# Altium footprint library BC9VPC.PcbLib: 1 footprints
Each footprint in its own frame and in the unit in brackets; x right, y up, seen from the top. Pads: shape width x height; smd on the part's side, far side on the other; paste and mask are expansions set on the pad; w line width, h text height; cw(c..) or ccw(c..) is an arc to the next point about the centre after c.
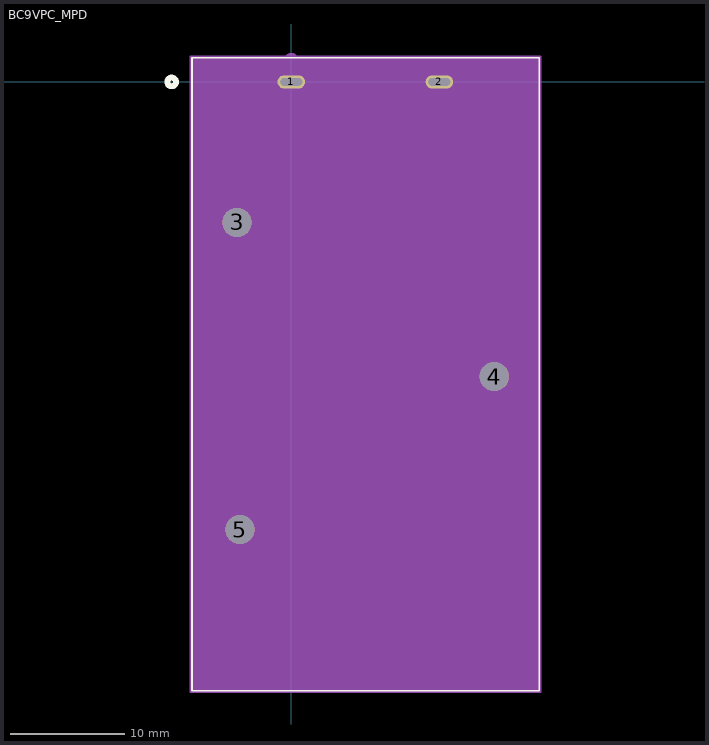
[diagram p0: the footprint, top view; thin cyan lines are the x and y axes]

## BC9VPC_MPD [mil]
pads (5):
  oval 95x46 hole 26 slot 75 at 0 deg paste-99999 mask+0: 1(0,0) 2(510,0)
  round 100 hole 100 unplated paste-99999 mask+0: 3(-187,-484) 4(699,-1015) 5(-177,-1542)
Top Overlay:
  circle w20: c-412,0 r15
  lines w6: -342,-2097 854,-2097 854,83 -342,83 -342,-2097
  text ".Designator" at 118.5,-25 h50
Bottom Overlay:
  circle w20: c-412,0 r15
Mechanical 13:
  circle w20: c0,75 r15
  lines w1: -337,-2092 849,-2092 849,78 -337,78 -337,-2092
  text ".Designator" at 118.5,-25 h50
Mechanical 15:
  region: 859,88 -347,88 -347,-2102 859,-2102
  lines w6: -347,-2102 -347,88 859,88 859,-2102 -347,-2102
3D body "BC9VPC.STEP": height 845, standoff -191, extent -338,-2090 848,80